# Altium footprint library leaded.PcbLib: 197 footprints (part 5 of 13)
Each footprint in its own frame and in the unit in brackets; x right, y up, seen from the top. Pads: shape width x height; smd on the part's side, far side on the other; paste and mask are expansions set on the pad; w line width, h text height; cw(c..) or ccw(c..) is an arc to the next point about the centre after c.
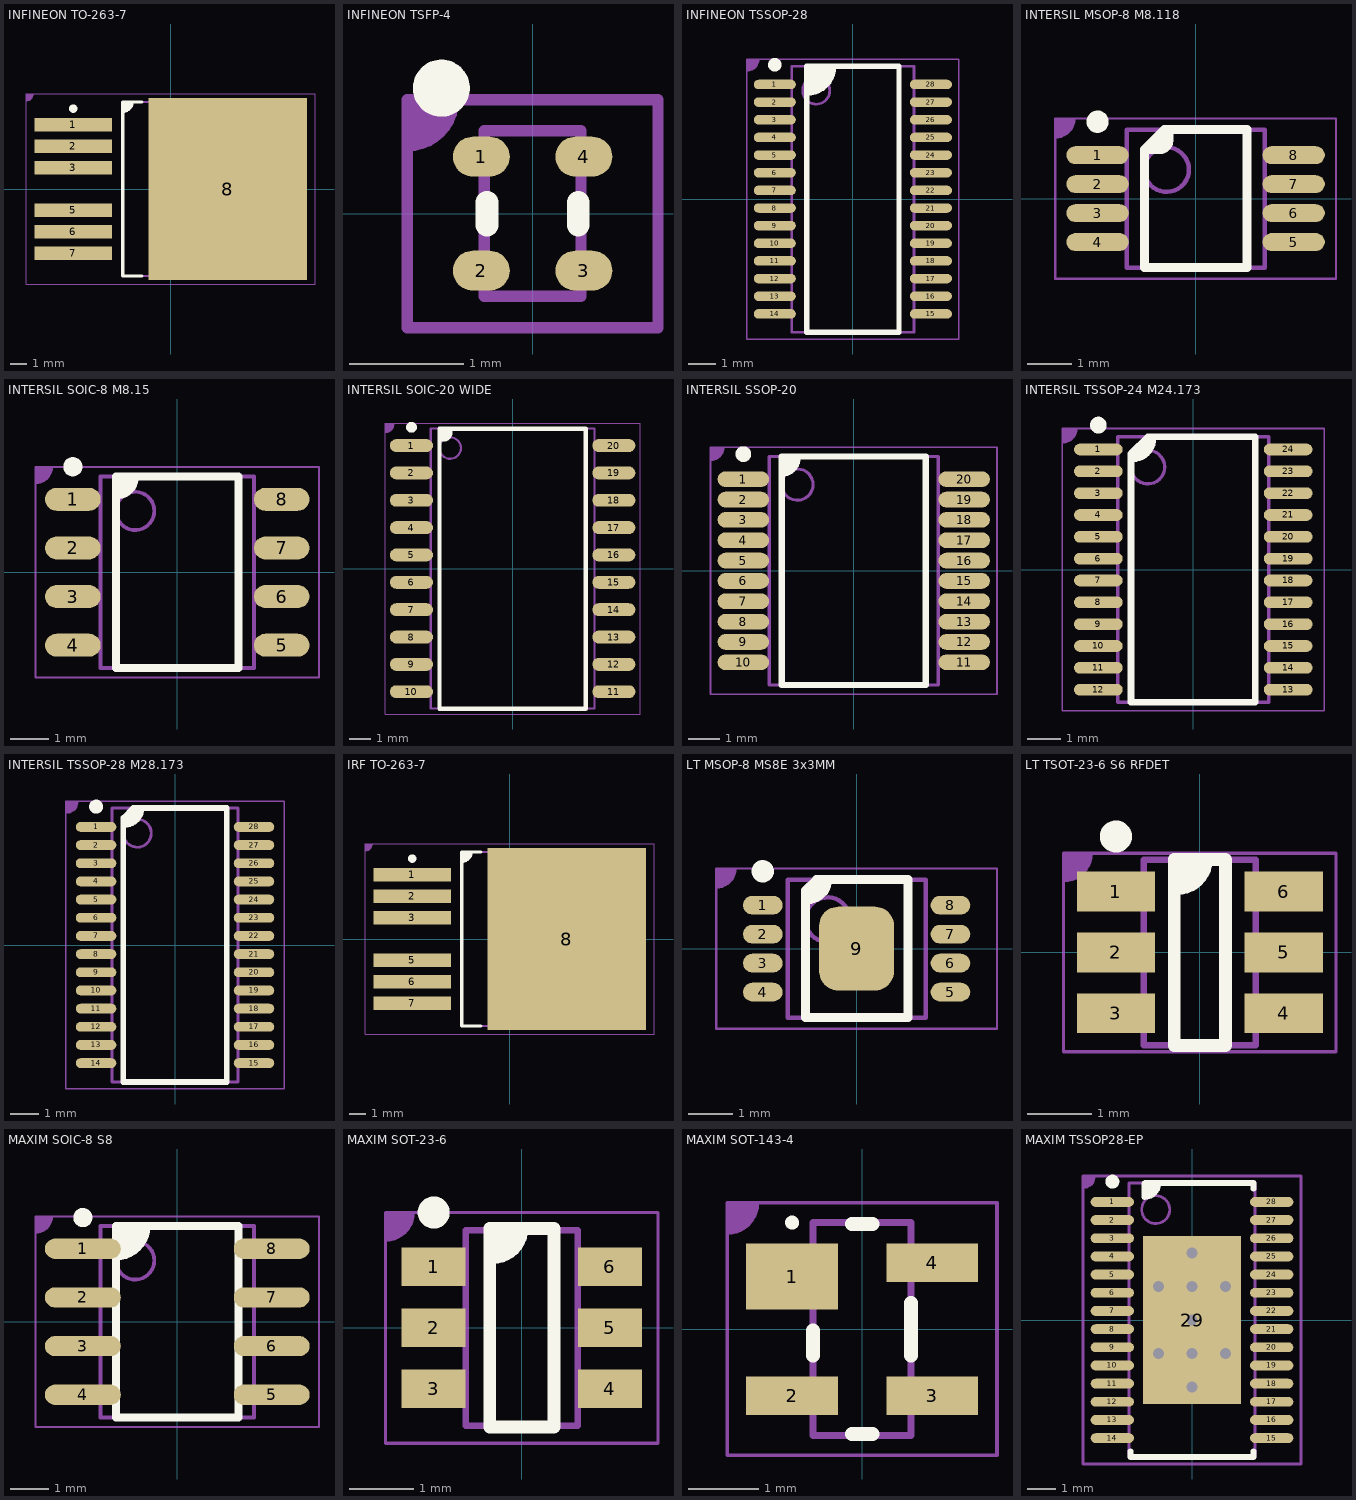
[diagram p4: the footprints below, top view; thin cyan lines are the x and y axes]

## INFINEON TO-263-7 [mm] "D2-PAK, 7-Pads, Body 7.82x8.52mm (max), IPC Medium Density"
height 4.57
pads (7):
  rect 4.6x0.8 smd: 1(-5.775,3.81) 2(-5.775,2.54) 3(-5.775,1.27) 5(-5.775,-1.27) 6(-5.775,-2.54) 7(-5.775,-3.81)
  rect 9.4x10.8 smd: 8(3.375,0)
Top Overlay:
  circle w0.25: c-5.775,4.76 r0.125
  region: -2.85,5.15 -2.288,5.15 -2.288,5.041 -2.371,4.838 -2.526,4.684 -2.728,4.6 -2.838,4.6 -2.85,4.6
  lines w0.2: -2.85,4.6 -2.838,4.6 ccw(c-2.838,5.15) -2.288,5.15 ; -1.725,-5.15 -2.85,-5.15 -2.85,5.15 -1.725,5.15
Mechanical 13:
  lines w0.1: -2.85,-5.15 -2.85,5.15 6.6,5.15 6.6,-5.15 -2.85,-5.15
Top Component (Mech14):
  region: -8.55,5.65 -8.55,5.212 -8.467,5.212 -8.416,5.263 -8.333,5.263 -8.155,5.441 -8.155,5.531 -8.119,5.568 -8.119,5.65
  lines w0.05: -8.55,-5.65 8.55,-5.65 8.55,5.65 -8.55,5.65 -8.55,-5.65
  lines w0.051: -8.55,5.219 ccw(c-8.55,5.65) -8.119,5.65
  text ".Designator" at -2.032,-1.27 h5.08
3D body "TO-263-7.STEP": height 4.54, standoff 0, extent -7.62,-5.08 7.63,5.08

## INFINEON TSFP-4 [mm] "TSFP, 4-Leads, Body 1.5x0.9mm (max), Pitch 1.00mm, IPC Medium Density"
pads (4):
  oval 0.5x0.35 smd: 1(-0.45,0.5) 2(-0.45,-0.5) 3(0.45,-0.5) 4(0.45,0.5)
Top Overlay:
  circle w0.25: c-0.8,1.1 r0.125
  lines w0.2: -0.4,-0.1 -0.4,0.1 ; 0.4,-0.1 0.4,0.1
Mechanical 13:
  lines w0.1: -0.425,-0.725 -0.425,0.725 0.425,0.725 0.425,-0.725 -0.425,-0.725
Top Component (Mech14):
  region: -1.1,1 -1.1,0.562 -1.017,0.562 -0.966,0.613 -0.883,0.613 -0.705,0.791 -0.705,0.881 -0.669,0.918 -0.669,1
  lines w0.051: -1.1,0.569 ccw(c-1.1,1) -0.669,1
  lines w0.1: -1.1,-1 -1.1,1 1.1,1 1.1,-1 -1.1,-1
  text ".Designator" at -0.254,-0.254 h0.76
3D body "TSFP-4.STEP": height 0.54, standoff 0, extent -0.6,-0.7 0.6,0.7

## INFINEON TSSOP-28 [mm] "SOP, 28-Leads, Body 9.7x4.4mm, Pitch 0.65mm, IPC Medium Density"
height 1.2
pads (28):
  oval 1.55x0.35 smd: 1(-2.875,4.225) 2(-2.875,3.575) 3(-2.875,2.925) 4(-2.875,2.275) 5(-2.875,1.625) 6(-2.875,0.975) 7(-2.875,0.325) 8(-2.875,-0.325) 9(-2.875,-0.975) 10(-2.875,-1.625) 11(-2.875,-2.275) 12(-2.875,-2.925) 13(-2.875,-3.575) 14(-2.875,-4.225) 15(2.875,-4.225) 16(2.875,-3.575) 17(2.875,-2.925) 18(2.875,-2.275) 19(2.875,-1.625) 20(2.875,-0.975) 21(2.875,-0.325) 22(2.875,0.325) 23(2.875,0.975) 24(2.875,1.625) 25(2.875,2.275) 26(2.875,2.925) 27(2.875,3.575) 28(2.875,4.225)
Top Overlay:
  circle w0.25: c-2.875,4.95 r0.125
  region: -1.7,3.9 -1.3,3.9 -0.7,4.5 -0.7,4.9 -1.7,4.9
  lines w0.2: -1.7,3.9 ccw(c-1.7,4.9) -0.7,4.9 ; -1.7,-4.9 -1.7,4.9 1.7,4.9 1.7,-4.9 -1.7,-4.9
Mechanical 13:
  circle w0.1: c-1.35,4 r0.5
  lines w0.1: -2.25,-4.9 -2.25,4.9 2.25,4.9 2.25,-4.9 -2.25,-4.9
Top Component (Mech14):
  region: -3.9,5.15 -3.9,4.712 -3.817,4.712 -3.766,4.763 -3.683,4.763 -3.505,4.941 -3.505,5.031 -3.469,5.068 -3.469,5.15
  lines w0.05: -3.9,-5.15 -3.9,5.15 3.9,5.15 3.9,-5.15 -3.9,-5.15
  lines w0.051: -3.9,4.719 ccw(c-3.9,5.15) -3.469,5.15
  text ".Designator" at -0.61,-0.406 h1.52
3D body "TSSOP-28.STEP": height 1.2, standoff 0, extent -3.21,-4.85 3.211,4.85

## INTERSIL MSOP-8 M8.118 [mm] "MSOP, 8-Leads, Body 3.00x3.00mm, Pitch 0.65mm, IPC Medium Density"
height 0.95
pads (8):
  oval 1.4x0.4 smd: 1(-2.2,0.975) 2(-2.2,0.325) 3(-2.2,-0.325) 4(-2.2,-0.975) 5(2.2,-0.975) 6(2.2,-0.325) 7(2.2,0.325) 8(2.2,0.975)
Top Overlay:
  circle w0.25: c-2.2,1.725 r0.125
  region: -0.7,1.55 -1.1,1.15 -0.85,1.15 -0.8,1.1 -0.6,1.3 -0.6,1.55
  lines w0.2: -1.15,1.1 -0.8,1.1 ccw(c-0.8,1.3) -0.6,1.3 -0.6,1.45 ccw(c-0.7,1.45) -0.7,1.55 ; -1.15,1.1 -1.15,-1.55 1.15,-1.55 1.15,1.55 -0.7,1.55 ; -1.15,1.1 -0.7,1.55
Mechanical 13:
  circle w0.1: c-0.65,0.65 r0.5
  lines w0.1: -1.55,-1.55 1.55,-1.55 1.55,1.55 -1.55,1.55 -1.55,-1.55
Top Component (Mech14):
  region: -3.15,1.8 -3.15,1.362 -3.067,1.362 -3.016,1.413 -2.933,1.413 -2.755,1.591 -2.755,1.681 -2.719,1.718 -2.719,1.8
  lines w0.05: -3.15,-1.8 -3.15,1.8 3.15,1.8 3.15,-1.8 -3.15,-1.8
  lines w0.051: -3.15,1.369 ccw(c-3.15,1.8) -2.719,1.8
  text ".Designator" at -0.61,-0.406 h1.52
3D body "MSOP-8.STEP": height 1.1, standoff 0, extent -2.46,-1.5 2.46,1.5

## INTERSIL SOIC-8 M8.15 [mm] "SOIC, 8-Leads, Body 4.90x3.90mm, Pitch 1.27mm, IPC Medium Density"
height 1.75
pads (8):
  oval 1.45x0.6 smd: 1(-2.725,1.905) 2(-2.725,0.635) 3(-2.725,-0.635) 4(-2.725,-1.905) 5(2.725,-1.905) 6(2.725,-0.635) 7(2.725,0.635) 8(2.725,1.905)
Top Overlay:
  circle w0.25: c-2.725,2.755 r0.125
  region: -1.6,2.5 -1.1,2.5 -1.1,2.3 -1.4,2 -1.6,2
  lines w0.2: -1.6,2 ccw(c-1.6,2.5) -1.1,2.5 ; -1.6,-2.5 -1.6,2.5 1.6,2.5 1.6,-2.5 -1.6,-2.5
Mechanical 13:
  circle w0.1: c-1.1,1.6 r0.5
  lines w0.1: -2,-2.5 -2,2.5 2,2.5 2,-2.5 -2,-2.5
Top Component (Mech14):
  region: -3.7,2.75 -3.7,2.312 -3.617,2.312 -3.566,2.363 -3.483,2.363 -3.305,2.541 -3.305,2.631 -3.269,2.668 -3.269,2.75
  lines w0.05: -3.7,-2.75 -3.7,2.75 3.7,2.75 3.7,-2.75 -3.7,-2.75
  lines w0.051: -3.7,2.319 ccw(c-3.7,2.75) -3.269,2.75
  text ".Designator" at -0.61,-0.406 h1.52
3D body "SO-8.STEP": height 1.5, standoff 0, extent -3.014,-2.45 3.014,2.45

## INTERSIL SOIC-20 WIDE [mm] "SOIC, 20-Leads, Body 12.80x7.50mm, Pitch 1.27mm, IPC Medium Density"
height 2.65
pads (20):
  oval 2x0.6 smd: 1(-4.7,5.715) 2(-4.7,4.445) 3(-4.7,3.175) 4(-4.7,1.905) 5(-4.7,0.635) 6(-4.7,-0.635) 7(-4.7,-1.905) 8(-4.7,-3.175) 9(-4.7,-4.445) 10(-4.7,-5.715) 11(4.7,-5.715) 12(4.7,-4.445) 13(4.7,-3.175) 14(4.7,-1.905) 15(4.7,-0.635) 16(4.7,0.635) 17(4.7,1.905) 18(4.7,3.175) 19(4.7,4.445) 20(4.7,5.715)
Top Overlay:
  circle w0.25: c-4.7,6.565 r0.125
  region: -3.4,6.5 -2.9,6.5 -2.9,6.3 -3.2,6 -3.4,6
  lines w0.2: -3.4,6 -3.2,6 ccw(c-3.2,6.3) -2.9,6.3 -2.9,6.5 ; -3.4,-6.5 3.4,-6.5 3.4,6.5 -3.4,6.5 -3.4,-6.5
Mechanical 13:
  circle w0.1: c-2.9,5.6 r0.5
  lines w0.1: -3.8,-6.5 3.8,-6.5 3.8,6.5 -3.8,6.5 -3.8,-6.5
Top Component (Mech14):
  region: -5.925,6.75 -5.925,6.312 -5.842,6.312 -5.791,6.363 -5.708,6.363 -5.53,6.541 -5.53,6.631 -5.494,6.668 -5.494,6.75
  lines w0.051: -5.925,6.319 ccw(c-5.925,6.75) -5.494,6.75 ; -5.925,-6.75 -5.925,6.75 5.925,6.75 5.925,-6.75 -5.925,-6.75
  text ".Designator" at -2.032,-1.27 h5.08
3D body "SOIC-20 Wide.STEP": height 2.65, standoff 0, extent -5.164,-6.4 5.164,6.4

## INTERSIL SSOP-20 [mm] "SSOP, 20-Leads, Body 7.20x5.29mm, Pitch 0.65mm, IPC Medium Density"
height 1.99
pads (20):
  oval 1.65x0.5 smd: 1(-3.525,2.925) 2(-3.525,2.275) 3(-3.525,1.625) 4(-3.525,0.975) 5(-3.525,0.325) 6(-3.525,-0.325) 7(-3.525,-0.975) 8(-3.525,-1.625) 9(-3.525,-2.275) 10(-3.525,-2.925) 11(3.525,-2.925) 12(3.525,-2.275) 13(3.525,-1.625) 14(3.525,-0.975) 15(3.525,-0.325) 16(3.525,0.325) 17(3.525,0.975) 18(3.525,1.625) 19(3.525,2.275) 20(3.525,2.925)
Top Overlay:
  circle w0.25: c-3.525,3.725 r0.125
  region: -1.8,3.65 -2.3,3.65 -2.3,3.1 -2.1,3.1 -1.8,3.4
  lines w0.2: -2.3,3.1 ccw(c-2.3,3.6) -1.8,3.6 ; -2.3,-3.65 2.3,-3.65 2.3,3.65 -2.3,3.65 -2.3,-3.65
Mechanical 13:
  circle w0.1: c-1.8,2.75 r0.5
  lines w0.1: -2.7,-3.65 2.7,-3.65 2.7,3.65 -2.7,3.65 -2.7,-3.65
Top Component (Mech14):
  region: -4.575,3.95 -4.575,3.512 -4.492,3.512 -4.441,3.563 -4.358,3.563 -4.18,3.741 -4.18,3.831 -4.144,3.868 -4.144,3.95
  lines w0.05: -4.575,-3.95 -4.575,3.95 4.575,3.95 4.575,-3.95 -4.575,-3.95
  lines w0.051: -4.575,3.519 ccw(c-4.575,3.95) -4.144,3.95
  text ".Designator" at -0.61,-0.406 h1.52
3D body "SSOP-20.STEP": height 1.97, standoff 0, extent -3.91,-3.6 3.911,3.6

## INTERSIL TSSOP-24 M24.173 [mm] "TSSOP, 24-Leads, Body 7.80x4.40mm, Pitch 0.65mm, IPC Medium Density"
height 1.2
pads (24):
  oval 1.45x0.35 smd: 1(-2.825,3.575) 2(-2.825,2.925) 3(-2.825,2.275) 4(-2.825,1.625) 5(-2.825,0.975) 6(-2.825,0.325) 7(-2.825,-0.325) 8(-2.825,-0.975) 9(-2.825,-1.625) 10(-2.825,-2.275) 11(-2.825,-2.925) 12(-2.825,-3.575) 13(2.825,-3.575) 14(2.825,-2.925) 15(2.825,-2.275) 16(2.825,-1.625) 17(2.825,-0.975) 18(2.825,-0.325) 19(2.825,0.325) 20(2.825,0.975) 21(2.825,1.625) 22(2.825,2.275) 23(2.825,2.925) 24(2.825,3.575)
Top Overlay:
  circle w0.25: c-2.825,4.3 r0.125
  region: -1.8,3.3 -1.681,3.3 -1.46,3.391 -1.291,3.56 -1.2,3.781 -1.2,3.9 -1.5,3.9 -1.8,3.6
  lines w0.2: -1.8,3.3 ccw(c-1.8,3.9) -1.2,3.9 ; -1.85,-3.95 1.85,-3.95 1.85,3.95 -1.35,3.95 -1.85,3.45 -1.85,-3.95
Mechanical 13:
  circle w0.1: c-1.35,3.05 r0.5
  lines w0.1: -2.25,-3.95 2.25,-3.95 2.25,3.95 -2.25,3.95 -2.25,-3.95
Top Component (Mech14):
  region: -3.9,4.2 -3.9,3.762 -3.817,3.762 -3.766,3.813 -3.683,3.813 -3.505,3.991 -3.505,4.081 -3.469,4.118 -3.469,4.2
  lines w0.05: -3.9,-4.2 -3.9,4.2 3.9,4.2 3.9,-4.2 -3.9,-4.2
  lines w0.051: -3.9,3.769 ccw(c-3.9,4.2) -3.469,4.2
  text ".Designator" at -0.61,-0.406 h1.52
3D body "TSSOP-24.STEP": height 1.2, standoff 0, extent -3.21,-3.9 3.211,3.9

## INTERSIL TSSOP-28 M28.173 [mm] "TSSOP, 28-Leads, Body 9.70x4.40mm, Pitch 0.65mm, IPC Medium Density"
height 1.2
pads (28):
  oval 1.45x0.35 smd: 1(-2.825,4.225) 2(-2.825,3.575) 3(-2.825,2.925) 4(-2.825,2.275) 5(-2.825,1.625) 6(-2.825,0.975) 7(-2.825,0.325) 8(-2.825,-0.325) 9(-2.825,-0.975) 10(-2.825,-1.625) 11(-2.825,-2.275) 12(-2.825,-2.925) 13(-2.825,-3.575) 14(-2.825,-4.225) 15(2.825,-4.225) 16(2.825,-3.575) 17(2.825,-2.925) 18(2.825,-2.275) 19(2.825,-1.625) 20(2.825,-0.975) 21(2.825,-0.325) 22(2.825,0.325) 23(2.825,0.975) 24(2.825,1.625) 25(2.825,2.275) 26(2.825,2.925) 27(2.825,3.575) 28(2.825,4.225)
Top Overlay:
  circle w0.25: c-2.825,4.95 r0.125
  region: -1.8,4.3 -1.681,4.3 -1.46,4.391 -1.291,4.56 -1.2,4.781 -1.2,4.9 -1.5,4.9 -1.8,4.6
  lines w0.2: -1.8,4.3 ccw(c-1.8,4.9) -1.2,4.9 ; -1.85,-4.9 -1.85,4.55 -1.5,4.9 1.85,4.9 1.85,-4.9 -1.85,-4.9
Mechanical 13:
  circle w0.1: c-1.35,4 r0.5
  lines w0.1: -2.25,-4.9 2.25,-4.9 2.25,4.9 -2.25,4.9 -2.25,-4.9
Top Component (Mech14):
  region: -3.9,5.15 -3.9,4.712 -3.817,4.712 -3.766,4.763 -3.683,4.763 -3.505,4.941 -3.505,5.031 -3.469,5.068 -3.469,5.15
  lines w0.05: -3.9,-5.15 3.9,-5.15 3.9,5.15 -3.9,5.15 -3.9,-5.15
  lines w0.051: -3.9,4.719 ccw(c-3.9,5.15) -3.469,5.15
  text ".Designator" at -0.61,-0.406 h1.52
3D body "TSSOP-28.STEP": height 1.2, standoff 0, extent -3.21,-4.85 3.211,4.85

## IRF TO-263-7 [mm] "D2-PAK, 7-Pads, Body 7.82x8.52mm (max), IPC Medium Density"
height 4.57
pads (7):
  rect 4.6x0.8 smd: 1(-5.775,3.81) 2(-5.775,2.54) 3(-5.775,1.27) 5(-5.775,-1.27) 6(-5.775,-2.54) 7(-5.775,-3.81)
  rect 9.4x10.8 smd: 8(3.375,0)
Top Overlay:
  circle w0.25: c-5.775,4.76 r0.125
  region: -2.85,5.15 -2.288,5.15 -2.288,5.041 -2.371,4.838 -2.526,4.684 -2.728,4.6 -2.838,4.6 -2.85,4.6
  lines w0.2: -2.85,4.6 -2.838,4.6 ccw(c-2.838,5.15) -2.288,5.15 ; -1.725,-5.15 -2.85,-5.15 -2.85,5.15 -1.725,5.15
Mechanical 13:
  lines w0.1: -2.85,-5.15 6.6,-5.15 6.6,5.15 -2.85,5.15 -2.85,-5.15
Top Component (Mech14):
  region: -8.55,5.65 -8.55,5.212 -8.467,5.212 -8.416,5.263 -8.333,5.263 -8.155,5.441 -8.155,5.531 -8.119,5.568 -8.119,5.65
  lines w0.05: -8.55,-5.65 -8.55,5.65 8.55,5.65 8.55,-5.65 -8.55,-5.65
  lines w0.051: -8.55,5.219 ccw(c-8.55,5.65) -8.119,5.65
  text ".Designator" at -2.032,-1.27 h5.08
3D body "TO-263-7.STEP": height 4.54, standoff 0, extent -7.62,-5.08 7.63,5.08

## LT MSOP-8 MS8E 3x3MM [mm] "MSOP, 8-Leads, Body 3.00x3.00mm, Pitch 0.65mm, IPC Medium Density"
height 1.1
pads (9):
  oval 0.89x0.42 smd: 1(-2.105,0.975) 2(-2.105,0.325) 3(-2.105,-0.325) 4(-2.105,-0.975) 5(2.105,-0.975) 6(2.105,-0.325) 7(2.105,0.325) 8(2.105,0.975)
  rrect50% 1.68x1.88 smd: 9(0,0)
Top Overlay:
  circle w0.25: c-2.105,1.735 r0.125
  region: -1.05,1.4 -0.65,1.55 -0.65,1.4 -0.95,1.1 -1.15,1.1
  lines w0.2: -1.15,1.1 -1.1,1.1 ccw(c-1.1,1.55) -0.65,1.55 ; -1.15,-1.55 -1.15,1.3 -0.9,1.55 1.15,1.55 1.15,-1.55 -1.15,-1.55
Mechanical 13:
  circle w0.1: c-0.65,0.65 r0.5
  lines w0.1: -1.55,-1.55 1.55,-1.55 1.55,1.55 -1.55,1.55 -1.55,-1.55
Top Component (Mech14):
  region: -3.15,1.8 -3.15,1.362 -3.067,1.362 -3.016,1.413 -2.933,1.413 -2.755,1.591 -2.755,1.681 -2.719,1.718 -2.719,1.8
  lines w0.05: -3.15,-1.8 -3.15,1.8 3.15,1.8 3.15,-1.8 -3.15,-1.8
  lines w0.051: -3.15,1.369 ccw(c-3.15,1.8) -2.719,1.8
  text ".Designator" at -0.61,-0.406 h1.52
3D body "LT MS8E.STEP": height 0.96, standoff 0, extent -2.459,-1.5 2.46,1.5

## LT TSOT-23-6 S6 RFDET [mm] "TSOT23, 6-Leads, Body 2.90x2.80mm, Pitch 0.95mm, IPC High Density"
height 1
pads (6):
  rect 1.22x0.62 smd: 1(-1.31,0.95) 2(-1.31,0) 3(-1.31,-0.95) 4(1.31,-0.95) 5(1.31,0) 6(1.31,0.95)
Top Overlay:
  circle w0.25: c-1.31,1.81 r0.125
  region: -0.4,1.45 0.1,1.45 0.1,1.3 -0.2,1 -0.4,1
  lines w0.2: -0.4,1 -0.35,1 ccw(c-0.35,1.45) 0.1,1.45 ; -0.4,-1.45 -0.4,1.45 0.4,1.45 0.4,-1.45 -0.4,-1.45
Mechanical 13:
  lines w0.1: -0.875,-1.45 0.875,-1.45 0.875,1.45 -0.875,1.45 -0.875,-1.45
Top Component (Mech14):
  region: -2.125,1.55 -2.125,1.112 -2.042,1.112 -1.991,1.163 -1.908,1.163 -1.73,1.341 -1.73,1.431 -1.694,1.468 -1.694,1.55
  lines w0.05: -2.125,-1.55 -2.125,1.55 2.125,1.55 2.125,-1.55 -2.125,-1.55
  lines w0.051: -2.125,1.119 ccw(c-2.125,1.55) -1.694,1.55
  text ".Designator" at -0.61,-0.406 h1.52
3D body "SOT-23-6.STEP": height 1, standoff 0, extent -1.194,-1.45 1.194,1.45

## MAXIM SOIC-8 S8 [mm] "SOIC, 8-Leads, Body 4.90x3.90mm, Pitch 1.27mm, IPC Medium Density"
height 1.75
pads (8):
  oval 1.98x0.53 smd: 1(-2.465,1.905) 2(-2.465,0.635) 3(-2.465,-0.635) 4(-2.465,-1.905) 5(2.465,-1.905) 6(2.465,-0.635) 7(2.465,0.635) 8(2.465,1.905)
Top Overlay:
  circle w0.25: c-2.465,2.72 r0.125
  region: -1.6,2.5 -0.8,2.5 -0.8,2.2 -1.3,1.7 -1.5,1.7
  lines w0.2: -1.6,1.7 ccw(c-1.6,2.5) -0.8,2.5 ; -1.6,-2.5 1.6,-2.5 1.6,2.5 -1.6,2.5 -1.6,-2.5
Mechanical 13:
  circle w0.1: c-1.1,1.6 r0.5
  lines w0.1: -2,-2.5 2,-2.5 2,2.5 -2,2.5 -2,-2.5
Top Component (Mech14):
  region: -3.7,2.75 -3.7,2.312 -3.617,2.312 -3.566,2.363 -3.483,2.363 -3.305,2.541 -3.305,2.631 -3.269,2.668 -3.269,2.75
  lines w0.05: -3.7,-2.75 -3.7,2.75 3.7,2.75 3.7,-2.75 -3.7,-2.75
  lines w0.051: -3.7,2.319 ccw(c-3.7,2.75) -3.269,2.75
  text ".Designator" at -0.61,-0.406 h1.52
3D body "SO-8.STEP": height 1.5, standoff 0, extent -3.014,-2.45 3.014,2.45

## MAXIM SOT-23-6 [mm] "SOT23, 6-Leads, Body 2.90x2.80mm, Pitch 0.95mm, IPC Medium Density"
height 1.1
pads (6):
  rect 1x0.6 smd: 1(-1.375,0.95) 2(-1.375,0) 3(-1.375,-0.95) 4(1.375,-0.95) 5(1.375,0) 6(1.375,0.95)
Top Overlay:
  circle w0.25: c-1.375,1.8 r0.125
  region: -0.5,1.55 0,1.55 0,1.4 -0.3,1.1 -0.5,1.1
  lines w0.2: -0.5,1.1 -0.45,1.1 ccw(c-0.45,1.55) 0,1.55 ; -0.5,-1.55 -0.5,1.55 0.5,1.55 0.5,-1.55 -0.5,-1.55
Mechanical 13:
  lines w0.1: -0.875,-1.525 0.875,-1.525 0.875,1.525 -0.875,1.525 -0.875,-1.525
Top Component (Mech14):
  region: -2.125,1.8 -2.125,1.362 -2.042,1.362 -1.991,1.413 -1.908,1.413 -1.73,1.591 -1.73,1.681 -1.694,1.718 -1.694,1.8
  lines w0.05: -2.125,-1.8 -2.125,1.8 2.125,1.8 2.125,-1.8 -2.125,-1.8
  lines w0.051: -2.125,1.369 ccw(c-2.125,1.8) -1.694,1.8
  text ".Designator" at -0.61,-0.406 h1.52
3D body "SOT-23-6.STEP": height 1, standoff 0, extent -1.194,-1.449 1.194,1.451

## MAXIM SOT-143-4 [mm] "SOT143, 4-Leads, Body 2.92x2.37mm, Pitch 1.90mm, IPC Medium Density"
height 1.2
pads (4):
  rect 1.31x0.94 smd: 1(-1,0.75)
  rect 1.31x0.55 smd: 2(-1,-0.95) 3(1,-0.95) 4(1,0.95)
Top Overlay:
  circle w0.1: c-1,1.52 r0.05
  lines w0.2: -0.7,-0.375 -0.7,-0.02 ; -0.145,-1.5 0.145,-1.5 ; -0.145,1.5 0.145,1.5 ; 0.7,-0.375 0.7,0.375
Mechanical 13:
  lines w0.1: -0.7,-1.52 -0.7,1.52 0.7,1.52 0.7,-1.52 -0.7,-1.52
Top Component (Mech14):
  region: -1.925,1.8 -1.925,1.362 -1.842,1.362 -1.791,1.413 -1.708,1.413 -1.53,1.591 -1.53,1.681 -1.494,1.718 -1.494,1.8
  lines w0.05: -1.925,-1.8 -1.925,1.8 1.925,1.8 1.925,-1.8 -1.925,-1.8
  lines w0.051: -1.925,1.369 ccw(c-1.925,1.8) -1.494,1.8
  text ".Designator" at -0.61,-0.406 h1.52
3D body "SOT-143-4.STEP": height 1.05, standoff 0, extent -1.189,-1.46 1.19,1.46

## MAXIM TSSOP28-EP [mm] "TSSOP, 28-Leads, Body 9.8x4.5mm (max), Pitch 0.65mm, IPC Medium Density"
height 1.1
pads (29):
  oval 1.55x0.35 smd: 1(-2.85,4.225) 2(-2.85,3.575) 3(-2.85,2.925) 4(-2.85,2.275) 5(-2.85,1.625) 6(-2.85,0.975) 7(-2.85,0.325) 8(-2.85,-0.325) 9(-2.85,-0.975) 10(-2.85,-1.625) 11(-2.85,-2.275) 12(-2.85,-2.925) 13(-2.85,-3.575) 14(-2.85,-4.225) 15(2.85,-4.225) 16(2.85,-3.575) 17(2.85,-2.925) 18(2.85,-2.275) 19(2.85,-1.625) 20(2.85,-0.975) 21(2.85,-0.325) 22(2.85,0.325) 23(2.85,0.975) 24(2.85,1.625) 25(2.85,2.275) 26(2.85,2.925) 27(2.85,3.575) 28(2.85,4.225)
  rect 3.5x6 smd: 29(0,0)
via 0,2.4 diameter 0.8 hole 0.4
via -1.2,1.2 diameter 0.8 hole 0.4
via 0,1.2 diameter 0.8 hole 0.4
via 1.2,1.2 diameter 0.8 hole 0.4
via 0,0 diameter 0.8 hole 0.4
via -1.2,-1.2 diameter 0.8 hole 0.4
via 0,-1.2 diameter 0.8 hole 0.4
via 1.2,-1.2 diameter 0.8 hole 0.4
via 0,-2.4 diameter 0.8 hole 0.4
Top Overlay:
  circle w0.25: c-2.85,4.95 r0.125
  region: -1.2,4.9 -1.675,4.9 -1.7,4.875 -1.7,4.4 -1.5,4.4 -1.2,4.7
  lines w0.2: -2.2,-4.7 -2.2,-4.9 2.2,-4.9 2.2,-4.7 ; 2.2,4.7 2.2,4.9 -1.675,4.9 ccw(c-1.675,4.875) -1.7,4.875 -1.7,4.4 ccw(c-1.7,4.9) -1.2,4.9 ; -1.2,4.9 -1.2,4.9
Mechanical 13:
  circle w0.1: c-1.3,3.95 r0.5
  lines w0.1: -2.25,-4.9 -2.25,4.9 2.25,4.9 2.25,-4.9 -2.25,-4.9
Top Component (Mech14):
  region: -3.9,5.15 -3.9,4.712 -3.817,4.712 -3.766,4.763 -3.683,4.763 -3.505,4.941 -3.505,5.031 -3.469,5.068 -3.469,5.15
  lines w0.051: -3.9,4.719 ccw(c-3.9,5.15) -3.469,5.15
  lines w0.1: -3.9,-5.15 3.9,-5.15 3.9,5.15 -3.9,5.15 -3.9,-5.15
  text ".Designator" at -0.61,-0.406 h1.52
3D body "TSSOP-28.STEP": height 1.2, standoff 0, extent -3.21,-4.85 3.211,4.85